# Altium schematic symbol library MAL214658471E3.SchLib: 1 symbol
Pins are listed as number, name and electrical type; pins without a type are passive.

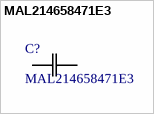
[diagram p0: symbol MAL214658471E3]

## MAL214658471E3
designator C?
Rad 63V 470uF 18x20 125Â°C (CA); Manufacturer_Name: Vishay; Copyright: Copyright (C) 2026 Ultra Librarian. All rights reserved.; Manufacturer_Part_Number: MAL214658471E3
footprint CAP_2135_18X20_VIS
pins: 1, 2